# Altium footprint library 1N4148WS_C7420319.PcbLib: 1 footprints
Each footprint in its own frame and in the unit in brackets; x right, y up, seen from the top. Pads: shape width x height; smd on the part's side, far side on the other; paste and mask are expansions set on the pad; w line width, h text height; cw(c..) or ccw(c..) is an arc to the next point about the centre after c.
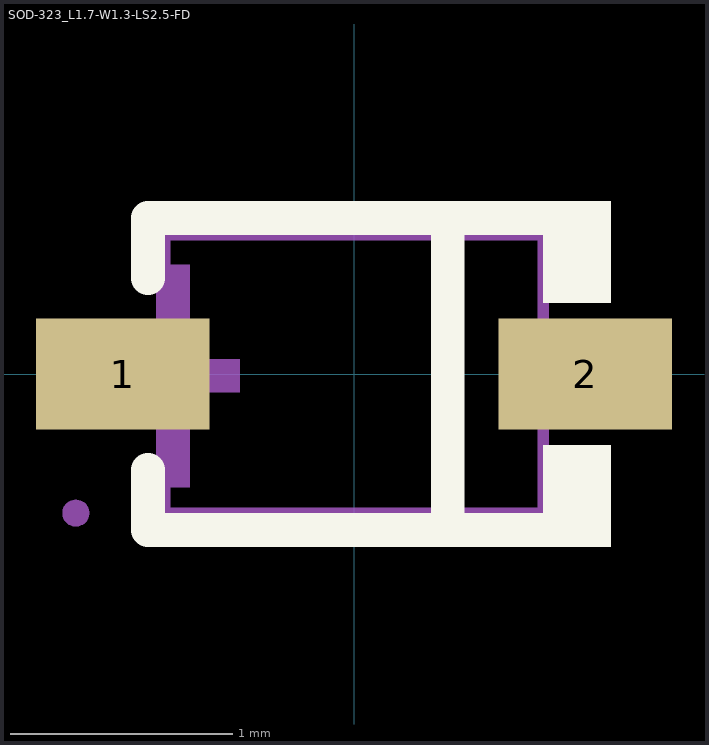
[diagram p0: the footprint, top view; thin cyan lines are the x and y axes]

## SOD-323_L1.7-W1.3-LS2.5-FD [mm]
pads (2):
  rect 0.78x0.5 smd: 1(-1.04,0) 2(1.04,0)
Top Overlay:
  region: 0.85,-0.32 1.155,-0.32 1.155,-0.777 0.85,-0.777
  region: 0.85,0.32 1.155,0.32 1.155,0.777 0.85,0.777
  lines w0.152: -0.926,-0.43 -0.926,-0.701 0.926,-0.701 ; -0.926,0.43 -0.926,0.701 0.926,0.701 ; 0.421,-0.701 0.421,0.701
Mechanical 2:
  region: -0.889,-0.508 -0.889,0.492 -0.739,0.492 -0.739,-0.508
  region: 1.316,-0.075 1.316,0.075 0.716,0.075 0.716,-0.075
  region: -1.114,-0.083 -1.114,0.067 -0.514,0.067 -0.514,-0.083
Mechanical 6:
  lines w0.051: -0.85,-0.625 -0.85,0.625 0.85,0.625 0.85,-0.625 -0.85,-0.625
Mechanical 7:
  region: 0.96,-0.16 0.84,-0.16 0.84,0.16 0.96,0.16
  region: -0.96,-0.16 -0.84,-0.16 -0.84,0.16 -0.96,0.16
Mechanical 8:
  region: -1.19,-0.625 -1.19,-0.63 -1.191,-0.639 -1.194,-0.648 -1.199,-0.657 -1.204,-0.664 -1.211,-0.671 -1.219,-0.676 -1.227,-0.681 -1.236,-0.684 -1.245,-0.685 -1.255,-0.685 -1.264,-0.684 -1.273,-0.681 -1.281,-0.676 -1.289,-0.671 -1.296,-0.664 -1.301,-0.657 -1.306,-0.648 -1.308,-0.639 -1.31,-0.63 -1.31,-0.625 -1.31,-0.62 -1.308,-0.611 -1.306,-0.602 -1.301,-0.594 -1.296,-0.586 -1.289,-0.579 -1.281,-0.574 -1.273,-0.57 -1.264,-0.567 -1.255,-0.565 -1.245,-0.565 -1.236,-0.567 -1.227,-0.57 -1.219,-0.574 -1.211,-0.579 -1.204,-0.586 -1.199,-0.594 -1.194,-0.602 -1.191,-0.611 -1.19,-0.62 -1.19,-0.625
Mechanical 9:
  region: 1.25,-0.16 0.95,-0.16 0.95,0.16 1.25,0.16
  region: -1.25,-0.16 -0.95,-0.16 -0.95,0.16 -1.25,0.16